# Altium footprint library PWR763A.PcbLib: 36 footprints (part 3 of 3)
Each footprint in its own frame and in the unit in brackets; x right, y up, seen from the top. Pads: shape width x height; smd on the part's side, far side on the other; paste and mask are expansions set on the pad; w line width, h text height; cw(c..) or ccw(c..) is an arc to the next point about the centre after c.
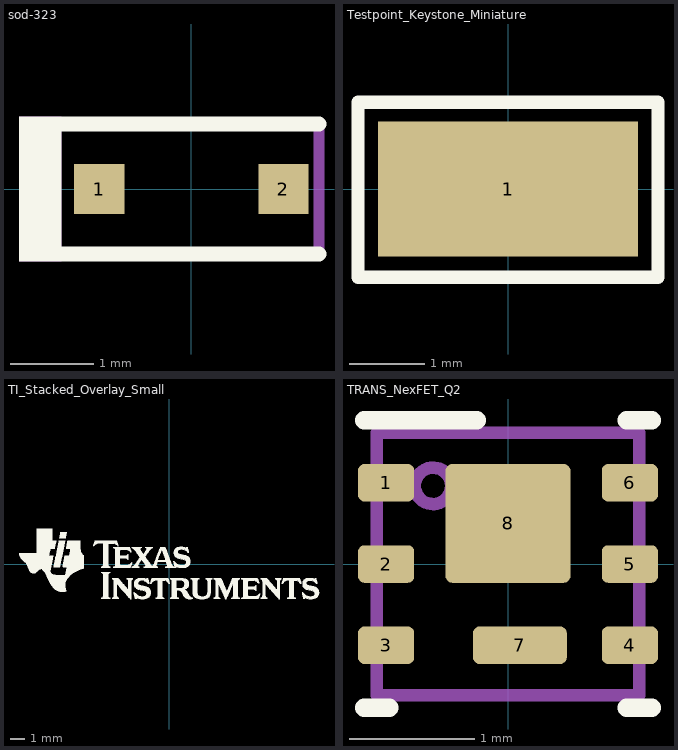
[diagram p2: the footprints below, top view; thin cyan lines are the x and y axes]

## sod-323 [mm] "NXP recommended land pattern"
height 1.15
pads (2):
  rect 0.6x0.6 smd: 1(-1.1,0) 2(1.1,0)
Top Overlay:
  rectangle: -2.057,-0.864 -1.549,0.864
  lines w0.178: -1.803,-0.775 0.1,-0.775 1.525,-0.775 ; -1.803,0.775 0.1,0.775 1.525,0.775
Mechanical 5:
  rectangle: -2.057,-0.864 -1.549,0.864
  lines w0.127: -1.803,-0.775 0.1,-0.775 1.525,-0.775 1.525,0.775 0.1,0.775 -1.803,0.775
3D body: height 1.1, standoff 0, extent -1.3,-0.675 1.3,0.675

## Testpoint_Keystone_Miniature [mil] "Miniature SMT test point"
height 90.55
pads (1):
  rect 135x70 smd: 1(0,0)
Top Overlay:
  lines w7: -78,-46 -78,-38 -78,45 -65,45 5,45 78,45 78,-46 -78,-46
Mechanical 5:
  lines w5: -78,-46 78,-46 78,45 5,45 -65,45 -78,45 -78,-38 -78,-46
3D body: height 60.6, standoff 0.6, extent -52.5,-20 52.5,20

## TI_Stacked_Overlay_Small [mm]
Top Overlay:
  drawing of 18 lines, arcs and shapes, not listed

## TRANS_NexFET_Q2 [mm] "TI recommended land pattern M0167-01"
height 0.8
pads (8):
  rrect33% 0.45x0.3 smd: 1(-0.975,0.65) 2(-0.975,0) 3(-0.975,-0.65) 4(0.975,-0.65) 5(0.975,0) 6(0.975,0.65)
  rrect33% 0.75x0.3 smd: 7(0.095,-0.65)
  rrect11% 1x0.95 smd: 8(0,0.325)
Top Overlay:
  lines w0.15: -1.15,-1.15 -0.95,-1.15 ; -1.15,1.15 -0.25,1.15 ; 0.95,-1.15 1.15,-1.15 ; 0.95,1.15 1.15,1.15
Mechanical 5:
  circle w0.1: c-0.6,0.625 r0.146
  lines w0.1: -1.05,-1.05 -1.05,1.05 1.05,1.05 1.05,-1.05 -1.05,-1.05
3D body: height 0.85, standoff 0, extent -1,-1 1.001,1